# Altium schematic symbol library QBFX2_Carrier.SchLib: 8 symbols
Pins are listed as number, name and electrical type; pins without a type are passive.

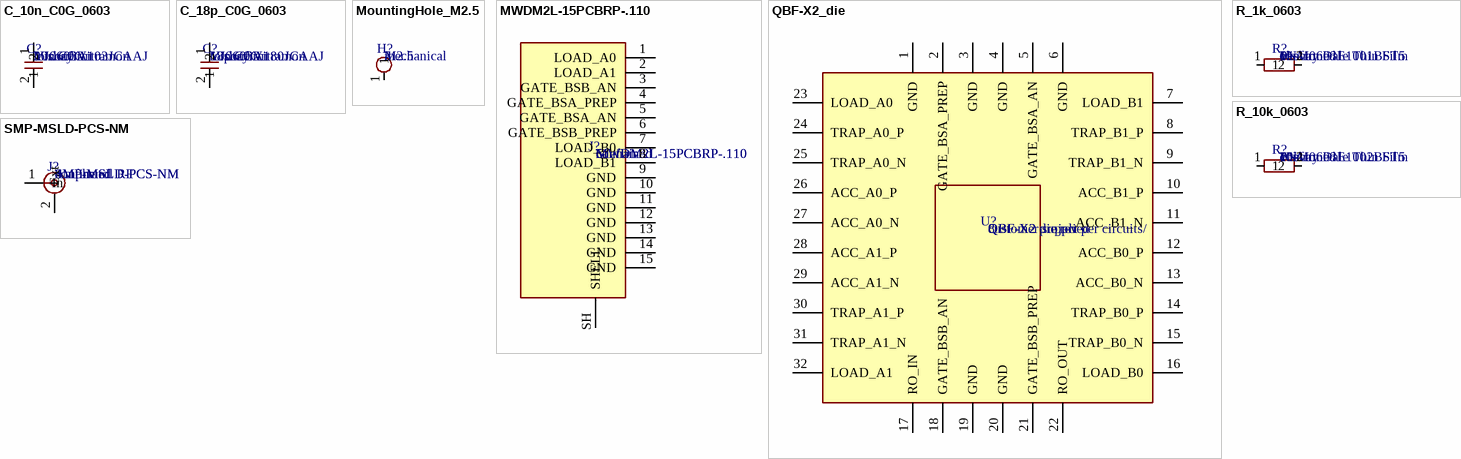
[diagram p0: symbols C_10n_C0G_0603 to SMP-MSLD-PCS-NM]

## C_10n_C0G_0603
designator C?  value 10n C0G  Manufacturer: Vishay Vitramon  Manufacturer Part Number: VJ0603A103JCAAJ  MPN Status: to confirm  QBF-X2 BOM item: 2
MLCC 10 nF 5 % 50 V C0G (NP0) 0603, VJ Non-Magnetic series (termination C = Cu barrier)
footprint C_0603_1608Metric
pins: 1, 2

## C_18p_C0G_0603
designator C?  value 18p C0G  Manufacturer: Vishay Vitramon  Manufacturer Part Number: VJ0603A180JCAAJ  MPN Status: to confirm  QBF-X2 BOM item: 1
MLCC 18 pF 5 % 50 V C0G (NP0) 0603, VJ Non-Magnetic series (termination C = Cu barrier)
footprint C_0603_1608Metric
pins: 1, 2

## MountingHole_M2.5
designator H?  value M2.5  MPN Status: mechanical  QBF-X2 BOM item: 3
Mounting hole 2.7 mm plated, GND; Manufacturer: -; Manufacturer Part Number: -
footprint MountingHole_2.7mm_M2.5_Pad
pins: 1

## MWDM2L-15PCBRP-.110
designator J?  value MWDM2L-15PCBRP-.110  Manufacturer: Glenair  MPN Status: confirmed  QBF-X2 BOM item: 5
Micro-D 15-pin plug, condensed right-angle PCB, jackposts; Manufacturer Part Number: MWDM2L-15PCBRP-.110
footprint MicroD_15P_Glenair_MWDM2L-15PCBRP
pins: 1 LOAD_A0, 2 LOAD_A1, 3 GATE_BSB_AN, 4 GATE_BSA_PREP, 5 GATE_BSA_AN, 6 GATE_BSB_PREP, 7 LOAD_B0, 8 LOAD_B1, 9 GND, 10 GND, 11 GND, 12 GND, 13 GND, 14 GND, 15 GND, SH SHELL

## QBF-X2_die
designator U?  value QBF-X2  Manufacturer: QBF-X2 project  Manufacturer Part Number: QBF-X2 die rev per circuits/  MPN Status: customer supplied  QBF-X2 BOM item: 8
QBF-X2 superconducting die 10 x 10 x 0.525 mm, wire-bonded (32 launchers, die_pads.json rev B)
footprint QBFX2_DIE_BONDPADS
pins: 1 GND, 2 GATE_BSA_PREP, 3 GND, 4 GND, 5 GATE_BSA_AN, 6 GND, 7 LOAD_B1, 8 TRAP_B1_P, 9 TRAP_B1_N, 10 ACC_B1_P, 11 ACC_B1_N, 12 ACC_B0_P, 13 ACC_B0_N, 14 TRAP_B0_P, 15 TRAP_B0_N, 16 LOAD_B0, 17 RO_IN, 18 GATE_BSB_AN, 19 GND, 20 GND, 21 GATE_BSB_PREP, 22 RO_OUT, 23 LOAD_A0, 24 TRAP_A0_P, 25 TRAP_A0_N, 26 ACC_A0_P, 27 ACC_A0_N, 28 ACC_A1_P, 29 ACC_A1_N, 30 TRAP_A1_P, 31 TRAP_A1_N, 32 LOAD_A1

## R_1k_0603
designator R?  value 1k  Manufacturer: Vishay Dale Thin Film  Manufacturer Part Number: PNM0603E1001BST5  MPN Status: confirmed  QBF-X2 BOM item: 6
Thin-film resistor 1 kOhm 0.1 % 25 ppm 0603, non-magnetic (PNM series)
footprint R_0603_1608Metric
pins: 1, 2

## R_10k_0603
designator R?  value 10k  Manufacturer: Vishay Dale Thin Film  Manufacturer Part Number: PNM0603E1002BST5  MPN Status: confirmed  QBF-X2 BOM item: 7
Thin-film resistor 10 kOhm 0.1 % 25 ppm 0603, non-magnetic (PNM series)
footprint R_0603_1608Metric
pins: 1, 2

## SMP-MSLD-PCS-NM
designator J?  value SMP-MSLD-PCS-NM  Manufacturer: Amphenol RF  MPN Status: confirmed  QBF-X2 BOM item: 4
SMP straight PCB jack, surface mount, limited detent, non-magnetic (BeCu/Au, LCP); Manufacturer Part Number: SMP-MSLD-PCS-NM
footprint SMP_Amphenol_SMP-MSLD-PCS-NM
pins: 1 In, 2 Ext